# Altium schematic symbol library Regulator.SchLib: 250 symbols (part 1 of 6)
Pins are listed as number, name and electrical type; pins without a type are passive.

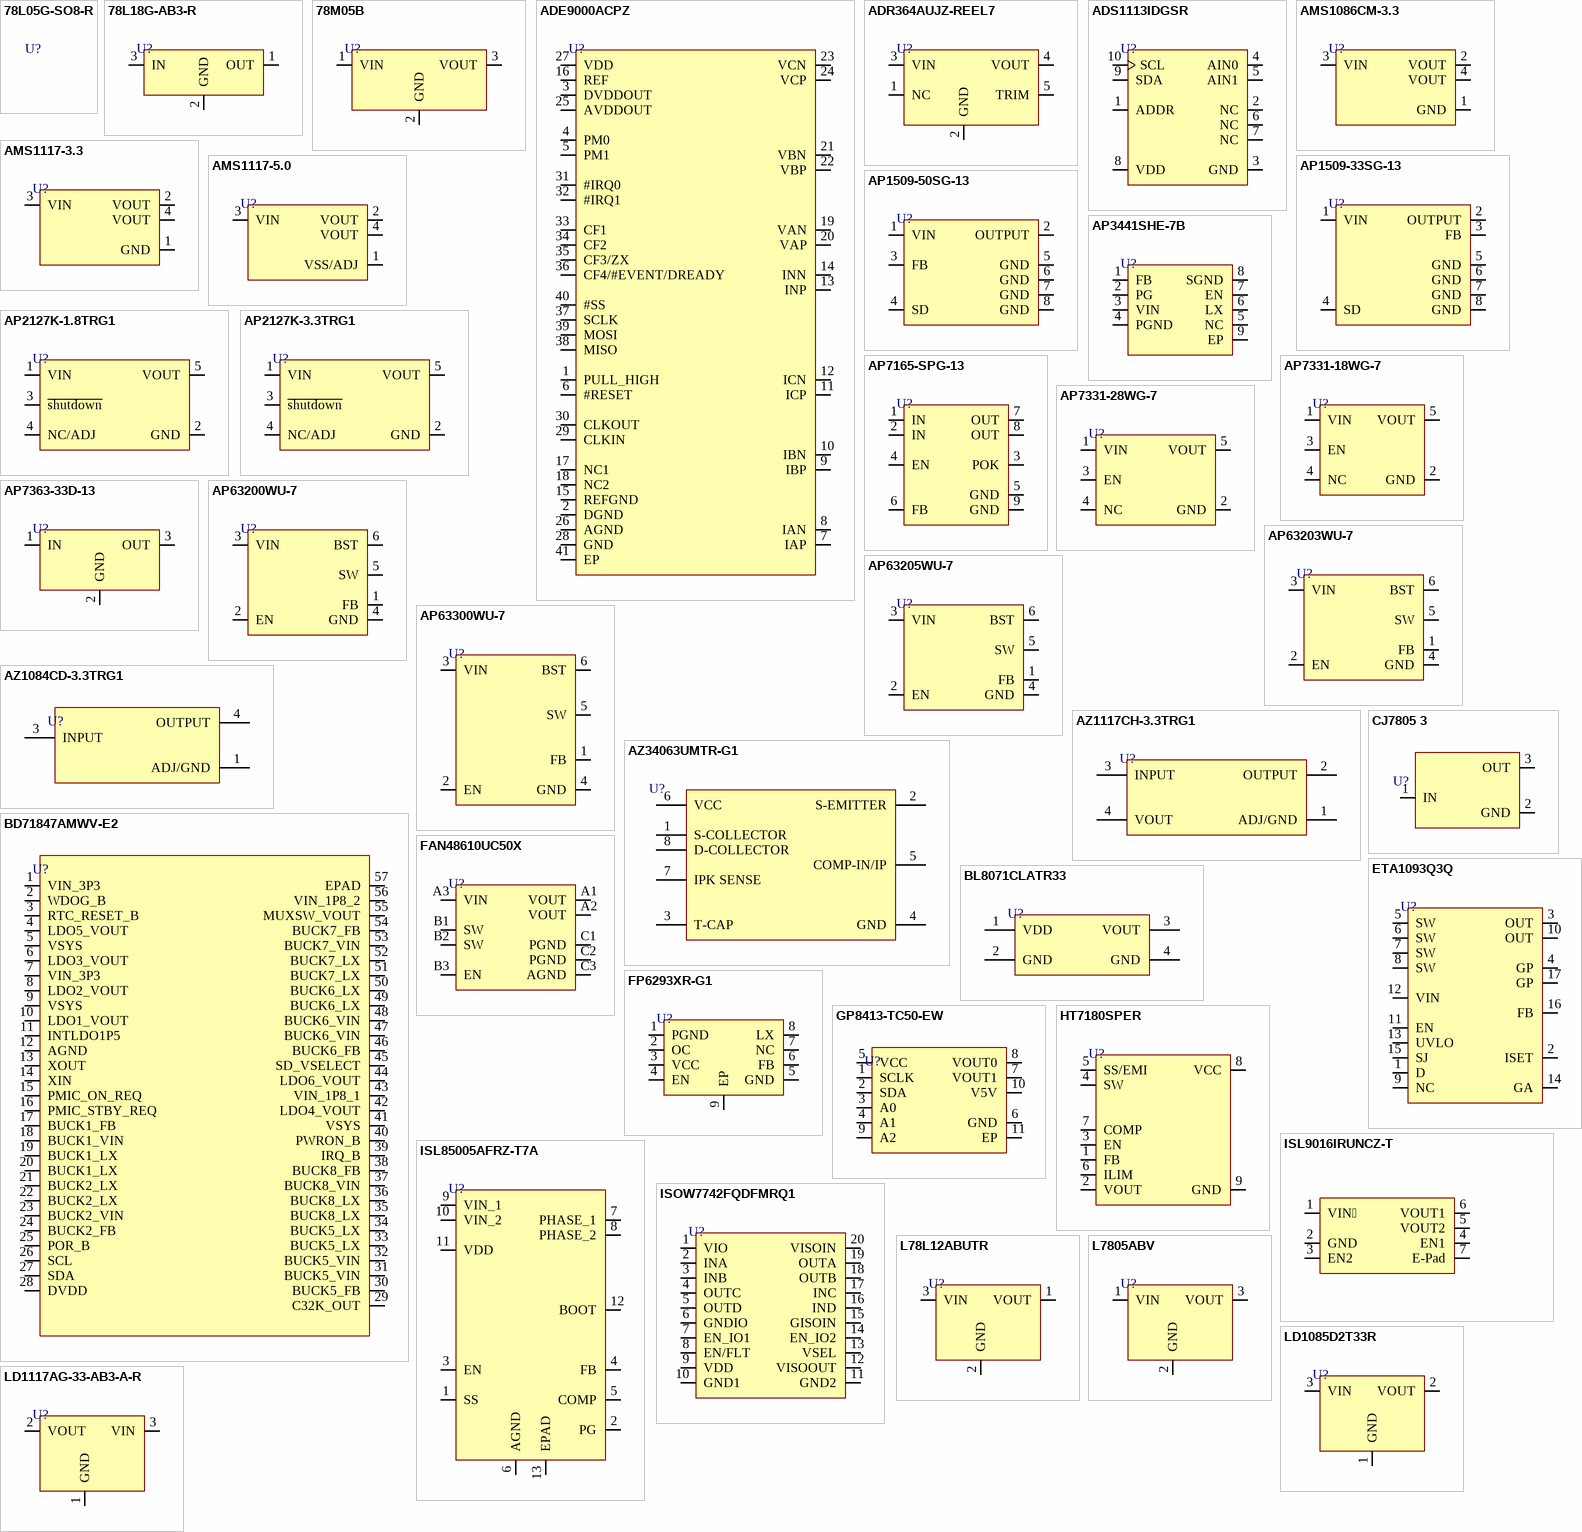
[diagram p0: symbols 78L05G-SO8-R to LD1117AG-33-AB3-A-R]

## 78L05G-SO8-R
designator U?
Pos 5V 0.1A 8-Pin SOP T/R; Manufacturer: Unisonic; Manufacturer Part Number: 78L05G-SO8-R; Item Type: IC; Package: SOP-8; LCSC Part Number: -; ComponentLink1Description: Chipsmall; ComponentLink1URL: https://www.chipsmall.com/Products/78L05G-SO8-R_35000047.html
footprint SOP-8

## 78L18G-AB3-R
designator U?
100mA Fixed 18V Positive electrode 35V SOT-89-3 Voltage Regulators - Linear, Low Drop Out (LDO) Regulators ROHS; Manufacturer: UTC; Manufacturer Part Number: 78L18G-AB3-R; Item Type: IC; Package: SOT-89-3; LCSC Part Number: C87308; ComponentLink1Description: LCSC; ComponentLink1URL: https://www.lcsc.com/product-detail/Voltage-Regulators-Linear-Low-Drop-Out-LDO-Regulators_UTC-Unisonic-Tech-78L18G-AB3-R_C87308.html
footprint SOT-89-3
pins: 1 OUT, 2 GND, 3 IN

## 78M05B
designator U?
80dB@(120Hz) 1.5A Fixed 5V Positive electrode 35V TO-252 Voltage Regulators - Linear, Low Drop Out (LDO) Regulators ROHS; Manufacturer: Slkor; Manufacturer Part Number: 78M05B; Item Type: IC; Package: TO-252; LCSC Part Number: C21714299; ComponentLink1Description: LCSC; ComponentLink1URL: https://www.lcsc.com/product-detail/Voltage-Regulators-Linear-Low-Drop-Out-LDO-Regulators_Slkor-SLKORMICRO-Elec-78M05B_C21714299.html
footprint TO-252-2L
pins: 1 VIN, 2 GND, 3 VOUT

## ADE9000ACPZ
designator U?
IC AFE 7 CHAN 40LFCSP-WQ; Manufacturer: Analog Devices; Manufacturer Part Number: ADE9000ACPZ; Supplier: Mouser; Supplier Part Number: 584-ADE9000ACPZ; RoHS: Yes; Item Type: IC; Stock: 7889; Pricing: 1=18.44, 10=13.35, 50=10.79, 100=10.79, 1000=10.52, 10000=10.52 (USD); ComponentLink1URL: http://www.farnell.com/datasheets/2280571.pdf?src-supplier=Farnell; ComponentLink1Description: http://www.farnell.com/datasheets/2280571.pdf?src-supplier=Farnell; ComponentLink2URL: https://datasheet.octopart.com/ADE9000ACPZ-Analog-Devices-datasheet-165826959.pdf?src-supplier=Element14; ComponentLink2Description: https://datasheet.octopart.com/ADE9000ACPZ-Analog-Devices-datasheet-165826959.pdf?src-supplier=Element14; ComponentLink3URL: https://www.analog.com/media/en/technical-documentation/data-sheets/ADE9000.pdf?src-supplier=Digikey; ComponentLink3Description: https://www.analog.com/media/en/technical-documentation/data-sheets/ADE9000.pdf?src-supplier=Digikey
footprint 40-LFCSP-WQ (6x6)
pins: 1 PULL_HIGH, 2 DGND, 3 DVDDOUT, 4 PM0, 5 PM1, 6 #RESET, 7 IAP, 8 IAN, 9 IBP, 10 IBN, 11 ICP, 12 ICN, 13 INP, 14 INN, 15 REFGND, 16 REF, 17 NC1, 18 NC2, 19 VAN, 20 VAP, 21 VBN, 22 VBP, 23 VCN, 24 VCP, 25 AVDDOUT, 26 AGND, 27 VDD, 28 GND, 29 CLKIN, 30 CLKOUT, 31 #IRQ0, 32 #IRQ1, 33 CF1, 34 CF2, 35 CF3/ZX, 36 CF4/#EVENT/DREADY, 37 SCLK, 38 MISO, 39 MOSI, 40 #SS, 41 EP

## ADR364AUJZ-REEL7
designator U?
IC VREF SERIES 0.2% TSOT5; Manufacturer: Analog Devices; Manufacturer Part Number: ADR364AUJZ-REEL7; Supplier: Digikey; LCSC Part Number: C659518; RoHS: Yes; Item Type: IC; Stock: 4393; Pricing: 1=2.73, 10=2.452, 25=2.318, 100=2.0089, 250=1.90588, 500=1.71014, 1000=1.44228 (USD); ComponentLink1URL: https://datasheet.ciiva.com/22697/751436-22697083.pdf?src-supplier=Element14; ComponentLink1Description: https://datasheet.ciiva.com/22697/751436-22697083.pdf?src-supplier=Element14; ComponentLink2URL: https://datasheet.ciiva.com/3237/adr360-361-363-364-365-366-3237020.pdf?src-supplier=Avnet; ComponentLink2Description: https://datasheet.ciiva.com/3237/adr360-361-363-364-365-366-3237020.pdf?src-supplier=Avnet; ComponentLink3URL: https://datasheet.ciiva.com/1172/751436-1172568.pdf?src-supplier=Element14; ComponentLink3Description: https://datasheet.ciiva.com/1172/751436-1172568.pdf?src-supplier=Element14
footprint TSOT-23-5
pins: 1 NC, 2 GND, 3 VIN, 4 VOUT, 5 TRIM

## ADS1113IDGSR
designator U?
IC ADC 16BIT SIGMA-DELTA 10VSSOP; Manufacturer: Texas Instruments; Manufacturer Part Number: ADS1113IDGSR; Supplier: Mouser; LCSC Part Number: C477969; RoHS: Yes; Item Type: IC; Stock: 1566; Pricing: 1=4.73, 10=3.6, 50=3.31, 100=2.87, 1000=2.75, 10000=2.11 (USD); Length: 3mm; Width: 3mm; Height: 1.07mm; Thickness: 1.02mm; Lead Free: 5697LeadFree; ComponentLink1URL: https://datasheet.ciiva.com/14260/sbas444b-14260060.pdf?src-supplier=Avnet; ComponentLink1Description: https://datasheet.ciiva.com/14260/sbas444b-14260060.pdf?src-supplier=Avnet; ComponentLink2URL: https://datasheet.ciiva.com/1303/ads1113-1303671.pdf?src-supplier=Digikey; ComponentLink2Description: https://datasheet.ciiva.com/1303/ads1113-1303671.pdf?src-supplier=Digikey
footprint VSSOP-10
pins: 1 ADDR "I2C slave address select", 2 NC, 3 GND "Ground", 4 AIN0 "Differential channel 1: Positive input or single-ended channel 1 input", 5 AIN1 "Differential channel 1: Negative input or single-ended channel 2 input", 6 NC, 7 NC, 8 VDD "Power supply: 2.0V to 5.5V", 9 SDA "Serial data: Transmits and receives data", 10 SCL "Serial clock input: Clocks data on SDA"

## AMS1086CM-3.3
designator U?
72dB@(120Hz) 1.5A Fixed 3.3V~3.3V Positive 15V TO-263-3 Linear Voltage Regulators (LDO) ROHS; Manufacturer: Advanced Monolithic Systems; Manufacturer Part Number: AMS1086CM-3.3; Item Type: IC; Package: TO-263-3; LCSC Part Number: C27632; ComponentLink1Description: LCSC; ComponentLink1URL: https://www.lcsc.com/product-detail/Linear-Voltage-Regulators-LDO_Advanced-Monolithic-Systems-AMS1086CM-3-3_C27632.html
footprint TO263-3_
pins: 1 GND, 2 VOUT, 3 VIN, 4 VOUT

## AMS1117-3.3
designator U?
SOT-223 Linear Voltage Regulators (LDO) ROHS; Manufacturer: GUOXIN JIAPIN SEMICONDUCTOR; Manufacturer Part Number: AMS1117-3.3; Item Type: IC; Package: SOT-223; LCSC Part Number: C2992570; ComponentLink1Description: LCSC; ComponentLink1URL: https://www.lcsc.com/product-detail/Linear-Voltage-Regulators-LDO_GUOXIN-JIAPIN-SEMICONDUCTOR-AMS1117-3-3_C2992570.html
footprint SOT- 223
pins: 1 GND, 2 VOUT, 3 VIN, 4 VOUT

## AMS1117-5.0
designator U?
SOT-223 Linear Voltage Regulators (LDO) ROHS; Manufacturer: HX(hengjiaxing); Manufacturer Part Number: AMS1117-5.0; Item Type: IC; Package: SOT-223; LCSC Part Number: C5181462; ComponentLink1Description: LCSC; ComponentLink1URL: https://www.lcsc.com/product-detail/Linear-Voltage-Regulators-LDO_HX-hengjiaxing-AMS1117-5-0_C5181462.html
footprint SOT- 223
pins: 1 VSS/ADJ, 2 VOUT, 3 VIN, 4 VOUT

## AP1509-33SG-13
designator U?
IC REG BUCK 3.3V 2A 8SOP; Manufacturer: Diodes; Manufacturer Part Number: AP1509-33SG-13; Supplier: Digi-Key; Supplier Part Number: AP1509-33SGDICT-ND; RoHS: Yes; Category: Voltage Regulators - Switching; Stock: 7160; Pricing: 1=1.6, 10=1.43, 25=1.3576, 100=1.115, 250=1.04232, 500=0.92112, 1000=0.7272 (USD); ComponentLink1URL: https://datasheet.ciiva.com/2024/ap1509-2024112.pdf?src-supplier=Digi-Key; ComponentLink1Description: https://datasheet.ciiva.com/2024/ap1509-2024112.pdf?src-supplier=Digi-Key; ComponentLink2URL: https://datasheet.ciiva.com/22696/608784-22696879.pdf?src-supplier=Element14; ComponentLink2Description: https://datasheet.ciiva.com/22696/608784-22696879.pdf?src-supplier=Element14; ComponentLink3URL: https://datasheet.ciiva.com/3220/ap1509-3220415.pdf?src-supplier=Avnet; ComponentLink3Description: https://datasheet.ciiva.com/3220/ap1509-3220415.pdf?src-supplier=Avnet; ComponentLink4URL: https://datasheet.ciiva.com/3222/ap1509-3222047.pdf?src-supplier=Avnet; ComponentLink4Description: https://datasheet.ciiva.com/3222/ap1509-3222047.pdf?src-supplier=Avnet; ComponentLink5URL: https://datasheet.ciiva.com/1161/608784-1161659.pdf?src-supplier=Element14; ComponentLink5Description: https://datasheet.ciiva.com/1161/608784-1161659.pdf?src-supplier=Element14; LCSC Part Number: C151823; Item Type: IC
footprint SOP-8L
pins: 1 VIN, 2 OUTPUT, 3 FB, 4 SD, 5 GND, 6 GND, 7 GND, 8 GND

## AP1509-50SG-13
designator U?
IC REG BUCK 5V 2A 8SOP; Manufacturer: Diodes; Manufacturer Part Number: AP1509-50SG-13; Number of Outputs: 1; Min Input Voltage: 4.5V; Max Supply Voltage: 22V; Efficiency: 83%; Switching Frequency: 150kHz; Synchronous Rectifier: No; Operating Supply Current: 5mA; Output Type: Fixed; Output Configuration: Positive; Frequency: 173kHz; Supplier 1: Rs; RoHS: Yes; Category: Voltage Regulators - Switching; Stock 1: 2230; Pricing 1: 25=1.20600, 125=0.91800, 625=0.81800, 1250=0.63800 (GBP); Mounting Technology: Surface Mount; Case/Package: SOP; Pins: 8; Weight: 0.030018oz; Contact Plating: Tin,Matte; Min Operating Temperature: -20°C; Max Operating Temperature: 85°C; Packaging: Tape and Reel; Output Voltage: 5V; Max Output current: 2A; Package Quantity: 2500; Output Current: 2A; Min Supply Voltage: 4.5V; Nominal Output Voltage: 5V; Min Output Voltage: 5V; Max Output Voltage: 5V; Operating Supply Voltage: 22V; Series: -; Length: 4.95mm; Width: 3.95mm; Height: 1.5mm; Reach SVHC Compliant: Yes; Lead Free: Lead Free; RoHS Compliant: Yes; ComponentLink1URL: https://datasheet.ciiva.com/1161/608784-1161660.pdf?src-supplier=Element14; ComponentLink1Description: https://datasheet.ciiva.com/1161/608784-1161660.pdf?src-supplier=Element14; Supplier Part Number 1: 7512923P; LCSC Part Number: C9984; Item Type: IC
footprint SOP-8
pins: 1 VIN, 2 OUTPUT, 3 FB, 4 SD, 5 GND, 6 GND, 7 GND, 8 GND

## AP2127K-1.8TRG1
designator U?
IC REG LDO 1.8V 0.3A SOT23-5; Manufacturer: Diodes; Manufacturer Part Number: AP2127K-1.8TRG1; Dropout Voltage: 600mV; Number of Outputs: 1; Min Input Voltage: 2.5V; Max Input Voltage: 6V; Output Current: 300mA; Polarity: Positive; Quiescent Current: 90uA; Reference Voltage: 800mV; Accuracy: 2%; Power Supply Rejection Ratio (PSRR): 68dB; Max Output Current: 400mA; Output Type: Fixed; Supplier 1: Digi-Key; RoHS: Yes; Category: Voltage Regulators - Linear; Stock 1: 112006; Pricing 1: 1=0.39000, 10=0.29400, 25=0.26480, 100=0.18290, 250=0.15400, 500=0.12512, 1000=0.09625 (USD); Mount: Surface Mount; Case/Package: SOT-23-5; Number of Pins: 5; Weight: 0.001058oz; Min Operating Temperature: -40°C; Max Operating Temperature: 85°C; Package Quantity: 3000; Packaging: Tape and Reel; Output Voltage: 1.8V; Number of Regulators: 1; Length: 3.1mm; Width: 1.7mm; Height: 1.3mm; Lead Free: Lead Free; RoHS Compliant: Yes; ComponentLink1URL: https://datasheet.ciiva.com/30016/ap2127-30016757.pdf?src-supplier=Avnet; ComponentLink1Description: https://datasheet.ciiva.com/30016/ap2127-30016757.pdf?src-supplier=Avnet; ComponentLink2URL: https://datasheet.ciiva.com/29569/ap2127-29569925.pdf?src-supplier=Digi-Key; ComponentLink2Description: https://datasheet.ciiva.com/29569/ap2127-29569925.pdf?src-supplier=Digi-Key; Supplier Part Number 1: AP2127K-1.8TRG1DICT-ND; Item Type: IC
footprint SOT-23-5
pins: 1 VIN, 2 GND, 3 ~{shutdown}, 4 NC/ADJ, 5 VOUT

## AP2127K-3.3TRG1
designator U?
IC REG LINEAR 3.3V 300MA SOT23-5; Manufacturer: Diodes; Manufacturer Part Number: AP2127K-3.3TRG1; Supplier: Arrow Electronics; LCSC Part Number: C156285; RoHS: Yes; Item Type: IC; Stock: 45000; Pricing: 3000=0.0623, 6000=0.0623 (USD); ComponentLink1URL: https://datasheet.ciiva.com/30016/ap2127-30016760.pdf?src-supplier=Avnet; ComponentLink1Description: https://datasheet.ciiva.com/30016/ap2127-30016760.pdf?src-supplier=Avnet; ComponentLink2URL: https://datasheet.ciiva.com/29569/ap2127-29569893.pdf?src-supplier=Digikey; ComponentLink2Description: https://datasheet.ciiva.com/29569/ap2127-29569893.pdf?src-supplier=Digikey
footprint SOT-23-5
pins: 1 VIN, 2 GND, 3 ~{shutdown}, 4 NC/ADJ, 5 VOUT

## AP3441SHE-7B
designator U?
IC REG BUCK ADJ 3A UDFN20208; Manufacturer: Diodes; Manufacturer Part Number: AP3441SHE-7B; Supplier: Digikey; LCSC Part Number: C2070918; RoHS: Yes; Item Type: IC; Stock: 2949; Pricing: 1=0.72, 10=0.43, 25=0.3544, 100=0.2688, 250=0.22676, 500=0.20086, 1000=0.17916 (USD); RoHS Compliant: Yes
footprint DFN2020-8-EP
pins: 1 FB, 2 PG, 3 VIN, 4 PGND, 5 NC, 6 LX, 7 EN, 8 SGND, 9 EP

## AP7165-SPG-13
designator U?
IC REG LINEAR POS ADJ 600MA 8SO; Manufacturer: Diodes; Manufacturer Part Number: AP7165-SPG-13; Output Voltage: 5V; Number of Outputs: 1; Min Input Voltage: 2.2V; Max Input Voltage: 5.5V; Max Power Dissipation: 1.9W; Polarity: Positive; Quiescent Current: 170uA; Accuracy: 2.5%; Output Type: Adjustable; Dropout Voltage: 300mV; Input Bias Current: 125uA; Reference Voltage: 800mV; Power Dissipation: 1.9kW; Power Rating: 4W; Power Supply Rejection Ratio (PSRR): 60dB; Supplier 1: Arrow Electronics; RoHS: Yes; Category: Voltage Regulators - Linear; Stock 1: 5000; Pricing 1: 2500=0.28480 (USD); Mount: Surface Mount; Case/Package: SOIC; Number of Pins: 8; Min Operating Temperature: -40°C; Max Operating Temperature: 85°C; Max Output Current: 600mA; Package Quantity: 2500; Output Current: 600mA; Packaging: Tape and Reel; Number of Regulators: 1; Min Current Limit: 600mA; Series: -; Length: 4.95mm; Width: 3.95mm; Height: 1.5mm; Radiation Hardening: No; Lead Free: Lead Free; RoHS Compliant: Yes; ComponentLink1URL: https://datasheet.ciiva.com/26856/getdatasheetpartid-624973-26856354.pdf?src-supplier=Verical; ComponentLink1Description: https://datasheet.ciiva.com/26856/getdatasheetpartid-624973-26856354.pdf?src-supplier=Verical; ComponentLink2URL: https://datasheet.ciiva.com/8240/ap7165-8240044.pdf?src-supplier=Avnet; ComponentLink2Description: https://datasheet.ciiva.com/8240/ap7165-8240044.pdf?src-supplier=Avnet; Supplier Part Number 1: AP7165-SPG-13; LCSC Part Number: C460364; Item Type: IC
footprint 8-SO-EP_
pins: 1 IN, 2 IN, 3 POK, 4 EN, 5 GND, 6 FB, 7 OUT, 8 OUT, 9 GND

## AP7331-18WG-7
designator U?
IC REG LINEAR 1.8V 300MA SOT25; Manufacturer: Diodes; Manufacturer Part Number: AP7331-18WG-7; Number of Outputs: 1; Min Input Voltage: 2V; Max Input Voltage: 6V; Max Power Dissipation: 640mW; Polarity: Positive; Quiescent Current: 55uA; Accuracy: 2%; Output Type: Fixed; Dropout Voltage: 550mV; Min Current Limit: 400mA; Reference Voltage: 400mV; Power Dissipation: 640W; Power Supply Rejection Ratio (PSRR): 65dB; Supplier 1: Digi-Key; RoHS: Yes; Category: Voltage Regulators - Linear; Stock 1: 2879; Pricing 1: 1=0.48000, 10=0.38700, 25=0.35400, 100=0.26360, 250=0.23884, 500=0.19766, 1000=0.14825 (USD); Mount: Surface Mount; Case/Package: SOT-25; Number of Pins: 5; Contact Plating: Tin,Matte; Min Operating Temperature: -40°C; Max Operating Temperature: 85°C; Max Output Current: 300mA; Output Voltage: 1.8V; Packaging: Tape and Reel; Output Current: 300mA; Package Quantity: 3000; Number of Regulators: 1; Series: AP7331; Length: 3.1mm; Width: 1.7mm; Height: 1.3mm; Radiation Hardening: No; Lead Free: Lead Free; REACH SVHC: No SVHC; RoHS Compliant: Yes; ComponentLink1URL: https://datasheet.ciiva.com/4887/ap7331-84206-4887904.pdf?src-supplier=Mouser; ComponentLink1Description: https://datasheet.ciiva.com/4887/ap7331-84206-4887904.pdf?src-supplier=Mouser; ComponentLink2URL: https://datasheet.ciiva.com/26856/getdatasheetpartid-661842-26856377.pdf?src-supplier=Verical; ComponentLink2Description: https://datasheet.ciiva.com/26856/getdatasheetpartid-661842-26856377.pdf?src-supplier=Verical; ComponentLink3URL: https://datasheet.ciiva.com/26908/ap7331-18wg-7-26908418.pdf?src-supplier=IIIC; ComponentLink3Description: https://datasheet.ciiva.com/26908/ap7331-18wg-7-26908418.pdf?src-supplier=IIIC; Supplier Part Number 1: AP7331-18WG-7DICT-ND; LCSC Part Number: C155293; Item Type: IC
footprint SOT-23-5
pins: 1 VIN, 2 GND, 3 EN, 4 NC, 5 VOUT

## AP7331-28WG-7
designator U?
IC REG LINEAR 2.8V 300MA SOT25; Manufacturer: Diodes; Manufacturer Part Number: AP7331-28WG-7; Number of Outputs: 1; Min Input Voltage: 2V; Max Input Voltage: 6V; Max Power Dissipation: 640mW; Polarity: Positive; Quiescent Current: 75uA; Accuracy: 2%; Output Type: Fixed; Dropout Voltage: 300mV; Operating Supply Current: 65uA; Reference Voltage: 400mV; Min Current Limit: 400mA; Power Supply Rejection Ratio (PSRR): 65dB; Supplier 1: Digi-Key; RoHS: Yes; Category: Voltage Regulators - Linear; Stock 1: 8767; Pricing 1: 1=0.52000, 10=0.41800, 25=0.38280, 100=0.28490, 250=0.25820, 500=0.21370, 1000=0.16027 (USD); Mount: Surface Mount; Case/Package: SOT-25; Number of Pins: 5; Min Operating Temperature: -40°C; Max Operating Temperature: 85°C; Max Output Current: 300mA; Output Voltage: 2.8V; Packaging: Tape and Reel; Package Quantity: 3000; Output Current: 300mA; Number of Regulators: 1; Series: -; Length: 3.1mm; Width: 1.7mm; Height: 1.3mm; Radiation Hardening: No; Lead Free: Lead Free; REACH SVHC: No SVHC; RoHS Compliant: Yes; ComponentLink1URL: https://datasheet.ciiva.com/17365/ap7331-17365896.pdf?src-supplier=Avnet+Europe; ComponentLink1Description: https://datasheet.ciiva.com/17365/ap7331-17365896.pdf?src-supplier=Avnet+Europe; Supplier Part Number 1: AP7331-28WG-7DICT-ND; LCSC Part Number: C460376; Item Type: IC
footprint SOT-23-5
pins: 1 VIN, 2 GND, 3 EN, 4 NC, 5 VOUT

## AP7363-33D-13
designator U?
IC REG LINEAR 3.3V 1.5A TO252-3; Manufacturer: Diodes; Manufacturer Part Number: AP7363-33D-13; Supplier: Mouser; LCSC Part Number: C108723; RoHS: Yes; Item Type: IC; Stock: 7040; Pricing: 1=0.92, 10=0.462, 50=0.462, 100=0.306, 1000=0.245, 10000=0.188 (USD); ComponentLink1URL: http://www.mouser.com/ds/2/115/AP7363-247326.pdf?src-supplier=Mouser; ComponentLink1Description: http://www.mouser.com/ds/2/115/AP7363-247326.pdf?src-supplier=Mouser; ComponentLink2URL: https://datasheet.octopart.com/AP7363-33D-13-Diodes-Inc.-datasheet-141402625.pdf?src-supplier=Element14; ComponentLink2Description: https://datasheet.octopart.com/AP7363-33D-13-Diodes-Inc.-datasheet-141402625.pdf?src-supplier=Element14; ComponentLink3URL: http://www.diodes.com/datasheets/AP7363.pdf?src-supplier=Avnet; ComponentLink3Description: http://www.diodes.com/datasheets/AP7363.pdf?src-supplier=Avnet; ComponentLink4URL: https://www.diodes.com/assets/Datasheets/AP7363.pdf?src-supplier=Digikey; ComponentLink4Description: https://www.diodes.com/assets/Datasheets/AP7363.pdf?src-supplier=Digikey; ComponentLink5URL: https://datasheet.octopart.com/AP7363-33D-13-Diodes-Inc.-datasheet-17557726.pdf?src-supplier=SHENGYU+ELECTRONICS; ComponentLink5Description: https://datasheet.octopart.com/AP7363-33D-13-Diodes-Inc.-datasheet-17557726.pdf?src-supplier=SHENGYU+ELECTRONICS
footprint TO-252-2L
pins: 1 IN, 2 GND, 3 OUT

## AP63200WU-7
designator U?
IC REG BUCK ADJUSTABLE 2A TSOT26; Manufacturer: Diodes; Manufacturer Part Number: AP63200WU-7; Supplier: Future Electronics; Supplier Part Number: 1108623; RoHS: Yes; Category: Voltage Regulators - Switching; Stock: 70; Pricing: 1=0.425, 15=0.385, 75=0.36, 300=0.345, 1500=0.315 (USD); ComponentLink1URL: https://www.diodes.com/assets/Datasheets/AP63200-AP63201-AP63203-AP63205.pdf?src-supplier=Digi-Key; ComponentLink1Description: https://www.diodes.com/assets/Datasheets/AP63200-AP63201-AP63203-AP63205.pdf?src-supplier=Digi-Key; LCSC Part Number: C2071868; Item Type: IC
footprint TSOT-26-6
pins: 1 FB, 2 EN, 3 VIN, 4 GND, 5 SW, 6 BST

## AP63203WU-7
designator U?
IC REG BUCK 3.3V 2A TSOT26; Manufacturer: Diodes; Manufacturer Part Number: AP63203WU-7; Supplier: Future Electronics; Supplier Part Number: 6109504; RoHS: Yes; Category: Voltage Regulators - Switching; Stock: 3000; Pricing: 3000=0.34, 6000=0.335, 9000=0.33, 12000=0.33, 15000=0.32 (USD); ComponentLink1URL: https://www.diodes.com/assets/Datasheets/AP63200-AP63201-AP63203-AP63205.pdf?src-supplier=Digi-Key; ComponentLink1Description: https://www.diodes.com/assets/Datasheets/AP63200-AP63201-AP63203-AP63205.pdf?src-supplier=Digi-Key; LCSC Part Number: C780769; Item Type: IC
footprint TSOT-23-6
pins: 1 FB, 2 EN, 3 VIN, 4 GND, 5 SW, 6 BST

## AP63205WU-7
designator U?
IC REG BUCK 5V 2A TSOT26; Manufacturer: Diodes; Manufacturer Part Number: AP63205WU-7; Supplier 1: Digi-Key; RoHS: Yes; Category: Voltage Regulators - Switching; Stock 1: 88525; Pricing 1: 1=0.88, 10=0.776, 25=0.7292, 100=0.5952, 250=0.55284, 500=0.4705, 1000=0.3764 (USD); Supplier Part Number 1: AP63205WU-7DICT-ND; LCSC Part Number: C2071056; Item Type: IC
footprint TSOT-23-6
pins: 1 FB, 2 EN, 3 VIN, 4 GND, 5 SW, 6 BST

## AP63300WU-7
designator U?
IC REG BUCK ADJ 3A TSOT26; Manufacturer: Diodes; Manufacturer Part Number: AP63300WU-7; Output Type: Adjustable; Output Configuration: Positive; Number of Outputs: 1; Min Input Voltage: 3.8V; Max Supply Voltage: 32V; Min Output Voltage: 800mV; Max Output Voltage: 31V; Switching Frequency: 500kHz; Synchronous Rectifier: Yes; Supplier: Digikey; Supplier Part Number: 31-AP63300WU-7CT-ND; RoHS: No; Category: Voltage Regulators - Switching; Stock: 11398; Pricing: 1=0.92, 10=0.818, 25=0.7764, 100=0.6379, 250=0.59628, 500=0.52696, 1000=0.41602 (USD); Mounting Technology: Surface Mount; Case/Package: SOT-23-6; Min Operating Temperature: -40°C; Max Operating Temperature: 85°C; Series: -; Output Current: 3A; RoHS Compliant: Yes; ComponentLink1URL: https://www.diodes.com/assets/Datasheets/AP63300-AP63301.pdf?src-supplier=Digikey; ComponentLink1Description: https://www.diodes.com/assets/Datasheets/AP63300-AP63301.pdf?src-supplier=Digikey; ComponentLink2URL: https://datasheet.octopart.com/AP63300WU-7-Diodes-Inc.-datasheet-149521342.pdf?src-supplier=Future+Electronics; ComponentLink2Description: https://datasheet.octopart.com/AP63300WU-7-Diodes-Inc.-datasheet-149521342.pdf?src-supplier=Future+Electronics; LCSC Part Number: C2158012; Item Type: IC
footprint TSOT-23-6
pins: 1 FB, 2 EN, 3 VIN, 4 GND, 5 SW, 6 BST

## AZ1084CD-3.3TRG1
designator U?
IC REG LINEAR 3.3V 5A TO252-2; Manufacturer: Diodes; Manufacturer Part Number: AZ1084CD-3.3TRG1; Number of Outputs: 1; Max Input Voltage: 12V; Dropout Voltage: 1.35V; Min Current Limit: 5.5A; Polarity: Positive; Quiescent Current: 5mA; Reference Voltage: 1.262V; Power Supply Rejection Ratio (PSRR): 72dB; Output Type: Fixed; Supplier 1: RSComponents; RoHS: Yes; Category: Voltage Regulators - Linear; Stock 1: 1000; Pricing 1: 100=0.23900, 200=0.22800, 400=0.21600, 800=0.20500 (GBP); Mount: Surface Mount; Case/Package: TO-252-3; Number of Pins: 3; Min Operating Temperature: 0°C; Max Operating Temperature: 125°C; Max Output Current: 5A; Output Voltage: 3.3V; Package Quantity: 2500; Packaging: Tape and Reel; Output Current: 5A; Number of Regulators: 1; Length: 6.73mm; Width: 6.22mm; Height: 2.38mm; RoHS Compliant: Yes; ComponentLink1URL: https://datasheet.ciiva.com/29570/az1084c-29570097.pdf?src-supplier=Digi-Key; ComponentLink1Description: https://datasheet.ciiva.com/29570/az1084c-29570097.pdf?src-supplier=Digi-Key; Supplier Part Number 1: 8287570P; LCSC Part Number: C151391; Item Type: IC
footprint TO-252AA
pins: 1 ADJ/GND, 3 INPUT, 4 OUTPUT

## AZ1117CH-3.3TRG1
designator U?
15V 1.3V @ 800mA Fixed 3.3V SOT-223 Linear Voltage Regulators (LDO) ROHS; Manufacturer: Diodes Incorporated; Manufacturer Part Number: AZ1117CH-3.3TRG1; Item Type: IC; Package: SOT-223; LCSC Part Number: C92102; ComponentLink1Description: LCSC; ComponentLink1URL: https://lcsc.com/product-detail/Linear-Voltage-Regulators-LDO_Diodes-Incorporated-AZ1117CH-3-3TRG1_C92102.html
footprint SOT- 223
pins: 1 ADJ/GND, 2 OUTPUT, 3 INPUT, 4 VOUT

## AZ34063UMTR-G1
designator U?
IC REG BUCK BST ADJ 1.5A 8SOIC; Manufacturer: Diodes; Manufacturer Part Number: AZ34063UMTR-G1; Number of Outputs: 1; Output Voltage: 36V; Min Input Voltage: 3V; Min Output Voltage: 1.25V; Switching Frequency: 180kHz; Synchronous Rectifier: No; Operating Supply Current: 4mA; Output Type: Adjustable; Supplier 1: Digi-Key; RoHS: Yes; Category: Power Supply Modules; Stock 1: 13716; Pricing 1: 1=0.51000, 10=0.41500, 25=0.37920, 100=0.28220, 250=0.25576, 500=0.21166, 1000=0.15875 (USD); Mount: Surface Mount; Case/Package: SOIC; Number of Pins: 8; Weight: 0.00261oz; Min Operating Temperature: -40°C; Max Operating Temperature: 85°C; Packaging: Tape and Reel; Max Output Current: 1.5A; Max Input Voltage: 36V; Package Quantity: 4000; Max Output Voltage: 36V; Output Current: 1.5A; Min Supply Voltage: 3V; Operating Supply Voltage: 36V; Length: 5.1mm; Width: 4mm; Height: 1.45mm; Lead Free: Lead Free; RoHS Compliant: Yes; ComponentLink1URL: https://datasheet.ciiva.com/29734/az34063u-29734577.pdf?src-supplier=Digi-Key; ComponentLink1Description: https://datasheet.ciiva.com/29734/az34063u-29734577.pdf?src-supplier=Digi-Key; ComponentLink2URL: https://datasheet.ciiva.com/29734/az34063u-29734583.pdf?src-supplier=Digi-Key; ComponentLink2Description: https://datasheet.ciiva.com/29734/az34063u-29734583.pdf?src-supplier=Digi-Key; ComponentLink3URL: https://datasheet.ciiva.com/29734/az34063u-29734572.pdf?src-supplier=Digi-Key; ComponentLink3Description: https://datasheet.ciiva.com/29734/az34063u-29734572.pdf?src-supplier=Digi-Key; Supplier Part Number 1: AZ34063UMTR-G1DICT-ND; LCSC Part Number: C99659; Item Type: IC
footprint SOIC-8
pins: 1 S-COLLECTOR, 2 S-EMITTER, 3 T-CAP, 4 GND, 5 COMP-IN/IP, 6 VCC, 7 IPK SENSE, 8 D-COLLECTOR

## BD71847AMWV-E2
designator U?
PMIC 12 Output Step-Down (Buck) (6), Linear (LDO) (6) 2MHz UQFN56BV7070; Manufacturer: Rohm; Manufacturer Part Number: BD71847AMWV-E2; Item Type: IC; Supplier: Rs; Supplier Part Number: 1887018; RoHS: Yes; Category: Voltage Regulators - Switching; Stock: 8; Pricing: 1=3.83, 10=3.72, 20=3.64 (GBP); ComponentLink1URL: http://www.farnell.com/datasheets/2788423.pdf?src-supplier=Farnell; ComponentLink1Description: http://www.farnell.com/datasheets/2788423.pdf?src-supplier=Farnell; ComponentLink2URL: https://www.rohm.com/datasheet/BD71847AMWV/bd71847amwv-e?src-supplier=Digi-Key; ComponentLink2Description: https://www.rohm.com/datasheet/BD71847AMWV/bd71847amwv-e?src-supplier=Digi-Key; ComponentLink3URL: https://datasheet.octopart.com/BD71847AMWV-E2-Rohm-datasheet-136696178.pdf?src-supplier=Future+Electronics; ComponentLink3Description: https://datasheet.octopart.com/BD71847AMWV-E2-Rohm-datasheet-136696178.pdf?src-supplier=Future+Electronics; ComponentLink4URL: http://www.farnell.com/datasheets/2788423.pdf?src-supplier=Newark; ComponentLink4Description: http://www.farnell.com/datasheets/2788423.pdf?src-supplier=Newark; ComponentLink5URL: https://datasheet.octopart.com/BD71847AMWV-E2-ROHM-datasheet-151900815.pdf?src-supplier=SHENGYU+ELECTRONICS; ComponentLink5Description: https://datasheet.octopart.com/BD71847AMWV-E2-ROHM-datasheet-151900815.pdf?src-supplier=SHENGYU+ELECTRONICS
footprint UQFN56BV7070
pins: 1 VIN_3P3, 2 WDOG_B, 3 RTC_RESET_B, 4 LDO5_VOUT, 5 VSYS, 6 LDO3_VOUT, 7 VIN_3P3, 8 LDO2_VOUT, 9 VSYS, 10 LDO1_VOUT, 11 INTLDO1P5, 12 AGND, 13 XOUT, 14 XIN, 15 PMIC_ON_REQ, 16 PMIC_STBY_REQ, 17 BUCK1_FB, 18 BUCK1_VIN, 19 BUCK1_LX, 20 BUCK1_LX, 21 BUCK2_LX, 22 BUCK2_LX, 23 BUCK2_VIN, 24 BUCK2_FB, 25 POR_B, 26 SCL, 27 SDA, 28 DVDD, 29 C32K_OUT, 30 BUCK5_FB, 31 BUCK5_VIN, 32 BUCK5_VIN, 33 BUCK5_LX, 34 BUCK5_LX, 35 BUCK8_LX, 36 BUCK8_LX, 37 BUCK8_VIN, 38 BUCK8_FB, 39 IRQ_B, 40 PWRON_B, 41 VSYS, 42 LDO4_VOUT, 43 VIN_1P8_1, 44 LDO6_VOUT, 45 SD_VSELECT, 46 BUCK6_FB, 47 BUCK6_VIN, 48 BUCK6_VIN, 49 BUCK6_LX, 50 BUCK6_LX, 51 BUCK7_LX, 52 BUCK7_LX, 53 BUCK7_VIN, 54 BUCK7_FB, 55 MUXSW_VOUT, 56 VIN_1P8_2, 57 EPAD

## BL8071CLATR33
designator U?
70dB@(100Hz) 1.5A Fixed 3.3V~3.3V Positive 6V SOT-223 Linear Voltage Regulators (LDO) ROHS; Manufacturer: BL(Shanghai Belling); Manufacturer Part Number: BL8071CLATR33; Item Type: IC; Package: SOT-223; LCSC Part Number: C401677; ComponentLink1Description: LCSC; ComponentLink1URL: https://www.lcsc.com/product-detail/Linear-Voltage-Regulators-LDO_BL-Shanghai-Belling-BL8071CLATR33_C401677.html
footprint SOT- 223
pins: 1 VDD, 2 GND, 3 VOUT, 4 GND

## CJ7805 3
designator U?
1.5A Fixed 5V Positive 35V TO-252 Linear Voltage Regulators (LDO) ROHS; Manufacturer: Jiangsu Changjing Electronics Technology Co; Manufacturer Part Number: CJ7805 3%; Item Type: IC; Package: TO-252; LCSC Part Number: C21706; ComponentLink1Description: LCSC; ComponentLink1URL: *
footprint TO-252-2L
pins: 1 IN, 2 GND, 3 OUT

## ETA1093Q3Q
designator U?
QFN3x3-16 DC-DC Converters ROHS; Manufacturer: etasolution; Manufacturer Part Number: ETA1093Q3Q; Item Type: IC; ComponentLink1Description: LCSC; ComponentLink1URL: https://www.lcsc.com/product-detail/DC-DC-Converters_etasolution-ETA1093Q3Q_C7435199.html; Package: QFN3x3-16; LCSC Part Number: C7435199
footprint 16-QFN (3x3).
pins: 1 D, 2 ISET, 3 OUT, 4 GP, 5 SW, 6 SW, 7 SW, 8 SW, 9 NC, 10 OUT, 11 EN, 12 VIN, 13 UVLO, 14 GA, 15 SJ, 16 FB, 17 GP

## FAN48610UC50X
designator U?
IC REG BOOST 5V 1A 9WLCSP; Manufacturer: ON Semiconductor / Fairchild; Manufacturer Part Number: FAN48610UC50X; Supplier: Avnet; Supplier Part Number: FAN48610UC50X; RoHS: Yes; Stock: 1164000; Pricing: 893=0.4144, 900=0.4032, 1800=0.392, 4500=0.3808, 9000=0.3696, 45000=0.3584, 90000=0.3472 (USD); ComponentLink1URL: https://datasheet.ciiva.com/29732/fan48610-29732973.pdf?src-supplier=Digi-Key; ComponentLink1Description: https://datasheet.ciiva.com/29732/fan48610-29732973.pdf?src-supplier=Digi-Key; ComponentLink2URL: https://datasheet.ciiva.com/29732/fan48610-29732983.pdf?src-supplier=Digi-Key; ComponentLink2Description: https://datasheet.ciiva.com/29732/fan48610-29732983.pdf?src-supplier=Digi-Key; ComponentLink3URL: https://datasheet.ciiva.com/30018/fan48610-30018312.pdf?src-supplier=Avnet; ComponentLink3Description: https://datasheet.ciiva.com/30018/fan48610-30018312.pdf?src-supplier=Avnet; LCSC Part Number: C890712; Item Type: IC
footprint WLCSP-9 (1.22x1.22)
pins: A1 VOUT, A2 VOUT, A3 VIN, B1 SW, B2 SW, B3 EN, C1 PGND, C2 PGND, C3 AGND

## FP6293XR-G1
designator U?
Boost type 13V 3.5A 2.6V~5.5V SOP-8-EP DC-DC Converters ROHS; Manufacturer: Advanced Analog Technology; Manufacturer Part Number: FP6293XR-G1; Item Type: IC; Package: SOP-8-EP; LCSC Part Number: C83576; ComponentLink1Description: LCSC; ComponentLink1URL: https://www.lcsc.com/product-detail/DC-DC-Converters_Advanced-Analog-Technology-FP6293XR-G1_C83576.html
footprint SOP-8-EP
pins: 1 PGND, 2 OC, 3 VCC, 4 EN, 5 GND, 6 FB, 7 NC, 8 LX, 9 EP

## GP8413-TC50-EW
designator U?
I2C ESOP-10 Digital to Analog Converters (DAC) ROHS; Manufacturer: Guestgood; Manufacturer Part Number: GP8413-TC50-EW; Item Type: IC; Package: ESOP-10; LCSC Part Number: C5464816; ComponentLink1Description: LCSC; ComponentLink1URL: https://www.lcsc.com/product-detail/Digital-to-Analog-Converters-DAC_Guestgood-GP8413-TC50-EW_C5464816.html
footprint ESOP-10
pins: 1 SCLK, 2 SDA, 3 A0, 4 A1, 5 VCC, 6 GND, 7 VOUT1, 8 VOUT0, 9 A2, 10 V5V, 11 EP

## HT7180SPER
designator U?
Boost type 12.8V 2.7V~12V 10A ESOP-8 DC-DC Converters ROHS; Manufacturer: Jiaxing Heroic Elec Tech; Manufacturer Part Number: HT7180SPER; Item Type: IC; Package: ESOP-8; LCSC Part Number: C22391195; ComponentLink1Description: LCSC; ComponentLink1URL: https://www.lcsc.com/product-detail/DC-DC-Converters_Jiaxing-Heroic-Elec-Tech-HT7180SPER_C22391195.html
footprint ESOP-8
pins: 1 FB, 2 VOUT, 3 EN, 4 SW, 5 SS/EMI, 6 ILIM, 7 COMP, 8 VCC, 9 GND

## ISL9016IRUNCZ-T
designator U?
IC REG LINEAR 3.3V/1.8V 6UTDFN; Item Type: IC; Supplier: Mouser; Supplier Part Number: 968-ISL9016IRUNCZ-T; RoHS: Yes; Stock: 3967; Pricing: 1=1.37, 10=1.16, 50=1.16, 100=0.891, 1000=0.622, 10000=0.53 (USD); ComponentLink2URL: https://www.renesas.com/en-us/www/doc/datasheet/isl9016.pdf?src-supplier=Digi-Key; ComponentLink2Description: https://www.renesas.com/en-us/www/doc/datasheet/isl9016.pdf?src-supplier=Digi-Key
footprint 6-UTDFN (1.6x1.6)
pins: 1 VIN, 2 GND, 3 EN2, 4 EN1, 5 VOUT2, 6 VOUT1, 7 E-Pad

## ISL85005AFRZ-T7A
designator U?
IC REG BUCK ADJ 5A 12DFN; Manufacturer: Renesas Electronics Corporation; Manufacturer Part Number: ISL85005AFRZ-T7A; Package: 12-DFN (4x3); LCSC Part Number: -; Item Type: IC; ComponentLink1Description: LCSC; ComponentLink1URL: *
footprint 12-DFN (4x3)
pins: 1 SS, 2 PG, 3 EN, 4 FB, 5 COMP, 6 AGND, 7 PHASE_1, 8 PHASE_2, 9 VIN_1, 10 VIN_2, 11 VDD, 12 BOOT, 13 EPAD

## ISOW7742FQDFMRQ1
designator U?
DGTL ISOLTR 5KV 4CH GP 20-SOIC; Manufacturer: Texas Instruments; Manufacturer Part Number: ISOW7742FQDFMRQ1; Manufacturer Lifecycle Status: ACTIVE; Item Type: IC; Supplier: DigiKey; LCSC Part Number: C7290756; RoHS: Compliant; Stock: 954; Pricing: 1=11.22, 10=8.791, 25=8.1828, 100=7.5143, 250=7.19556 (USD); Case/Package: SOIC; Height: 3.55mm; Length: 12.83mm; Lifecycle Status: Production; Pins: 20; Thickness: 3.18mm; Width: 7.5mm; ComponentLink1URL: https://octopart.com:443/opatz8j6/c1?t=wZ0VCNJNos8uhiG1eOkJItGa29TZdX9U5YTvWe65tWqO_clHypEFr90RSsXmtcjCK2lW9JuoFSTCHleqZo0hvXambyFVrpWhRDa03zjAeS2npBFLn2ZdeMlI2NbNyxFRjGATeyzf-9uJODUaKIYeHY0lNBoElZKV5up7xkArN1ypBwkxG7CcSc59dO75okYBL3LvDjsmP-oaFvA5nypAE6t8qM1AzvKVH_C58px1fMdxx7wnDMIkasCTkH6HTWSujntXBLRFzafi1R2mnSXrnxzWfLveYPYV0EuD-426-OKnMTyvQmQHdlNqpjdCJ7MI8xbtVI0kVoJo1JZo_cB_-LeUlxckVEohInKxuXCkBIy0H9Ix6KfV1cXw-79mm5rpOwHRdyZRgldXjg&src-supplier=Texas+Instruments; ComponentLink1Description: https://octopart.com:443/opatz8j6/c1?t=wZ0VCNJNos8uhiG1eOkJItGa29TZdX9U5YTvWe65tWqO_clHypEFr90RSsXmtcjCK2lW9JuoFSTCHleqZo0hvXambyFVrpWhRDa03zjAeS2npBFLn2ZdeMlI2NbNyxFRjGATeyzf-9uJODUaKIYeHY0lNBoElZKV5up7xkArN1ypBwkxG7CcSc59dO75okYBL3LvDjsmP-oaFvA5nypAE6t8qM1AzvKVH_C58px1fMdxx7wnDMIkasCTkH6HTWSujntXBLRFzafi1R2mnSXrnxzWfLveYPYV0EuD-426-OKnMTyvQmQHdlNqpjdCJ7MI8xbtVI0kVoJo1JZo_cB_-LeUlxckVEohInKxuXCkBIy0H9Ix6KfV1cXw-79mm5rpOwHRdyZRgldXjg&src-supplier=Texas+Instruments; ComponentLink2URL: http://sigma.octopart.com:80/reach_statement/Texas-Instruments-company-64.pdf?src-supplier=Compliance+Statements; ComponentLink2Description: http://sigma.octopart.com:80/reach_statement/Texas-Instruments-company-64.pdf?src-supplier=Compliance+Statements; ComponentLink3URL: http://sigma.octopart.com:80/conflict_mineral_statement/Texas-Instruments-company-63.pdf?src-supplier=Compliance+Statements; ComponentLink3Description: http://sigma.octopart.com:80/conflict_mineral_statement/Texas-Instruments-company-63.pdf?src-supplier=Compliance+Statements
footprint SOIC-20-300mil
pins: 1 VIO, 2 INA, 3 INB, 4 OUTC, 5 OUTD, 6 GNDIO, 7 EN_IO1, 8 EN/FLT, 9 VDD, 10 GND1, 11 GND2, 12 VISOOUT, 13 VSEL, 14 EN_IO2, 15 GISOIN, 16 IND, 17 INC, 18 OUTB, 19 OUTA, 20 VISOIN

## L78L12ABUTR
designator U?
IC REG LINEAR 12V 100MA SOT89-3; Manufacturer: STMicroelectronics; Manufacturer Part Number: L78L12ABUTR; Supplier: Future Electronics; LCSC Part Number: C915681; RoHS: Yes; Item Type: IC; Stock: 30000; Pricing: 2500=0.136, 7500=0.132, 12500=0.13, 50000=0.126, 75000=0.123 (USD); ComponentLink1URL: https://datasheet.ciiva.com/4882/cd00000446-4882438.pdf?src-supplier=Mouser; ComponentLink1Description: https://datasheet.ciiva.com/4882/cd00000446-4882438.pdf?src-supplier=Mouser; ComponentLink2URL: https://datasheet.ciiva.com/16500/cd00000446-16500639.pdf?src-supplier=Future+Electronics; ComponentLink2Description: https://datasheet.ciiva.com/16500/cd00000446-16500639.pdf?src-supplier=Future+Electronics; ComponentLink3URL: https://datasheet.ciiva.com/3224/cd00000446-3224991.pdf?src-supplier=Avnet; ComponentLink3Description: https://datasheet.ciiva.com/3224/cd00000446-3224991.pdf?src-supplier=Avnet; ComponentLink4URL: https://datasheet.ciiva.com/2048/cd00000446-2048328.pdf?src-supplier=Digikey; ComponentLink4Description: https://datasheet.ciiva.com/2048/cd00000446-2048328.pdf?src-supplier=Digikey; ComponentLink5URL: https://datasheet.ciiva.com/2048/cd00000446-2048329.pdf?src-supplier=Digikey; ComponentLink5Description: https://datasheet.ciiva.com/2048/cd00000446-2048329.pdf?src-supplier=Digikey; ComponentLink6URL: https://datasheet.ciiva.com/2048/cd00000446-2048330.pdf?src-supplier=Digikey; ComponentLink6Description: https://datasheet.ciiva.com/2048/cd00000446-2048330.pdf?src-supplier=Digikey
footprint SOT-89-3
pins: 1 VOUT, 2 GND, 3 VIN

## L7805ABV
designator U?
IC REG LINEAR 5V 1.5A TO220AB; Manufacturer: STMicroelectronics; Manufacturer Part Number: L7805ABV; Max Supply Voltage: 35V; Number of Outputs: 1; Max Output current: 1A; Polarity: Positive; Quiescent Current: 6mA; Accuracy: 2%; Output Type: Fixed; Min Input Voltage: 7V; Dropout Voltage: 2V; Power Supply Rejection Ratio (PSRR): 68dB; Item Type: Regulator; Supplier: Mouser; Supplier Part Number: 511-L7805ABV; RoHS: Yes; Category: Voltage Regulators - Linear; Stock: 15048; Pricing: 1=0.75, 10=0.626, 50=0.626, 100=0.511, 1000=0.313, 10000=0.276 (USD); Mounting Technology: Through Hole; Case/Package: TO; Pins: 3; Min Operating Temperature: -40°C; Max Operating Temperature: 125°C; Output Voltage: 5V; Output Current: 1.5A; Packaging: Rail/Tube; Package Quantity: 50; Nominal Output Voltage: 5V; Number of Regulators: 1; Min Output Voltage: 5V; Max Output Voltage: 5V; Output Voltage Accuracy: 2%; Series: -; Output Configuration: Positive; Length: 10.4mm; Width: 4.6mm; Height: 9.15mm; Radiation Hardening: No; Reach SVHC Compliant: No; Lead Free: Lead Free; RoHS Compliant: Yes; ComponentLink1URL: https://datasheet.ciiva.com/1512/1696820-1512331.pdf?src-supplier=Element14; ComponentLink1Description: https://datasheet.ciiva.com/1512/1696820-1512331.pdf?src-supplier=Element14; ComponentLink2URL: https://datasheet.ciiva.com/2052/cd00000444-2052290.pdf?src-supplier=Digi-Key; ComponentLink2Description: https://datasheet.ciiva.com/2052/cd00000444-2052290.pdf?src-supplier=Digi-Key; ComponentLink3URL: https://datasheet.ciiva.com/1511/1805459-1511907.pdf?src-supplier=Element14; ComponentLink3Description: https://datasheet.ciiva.com/1511/1805459-1511907.pdf?src-supplier=Element14; LCSC Part Number: C16807
footprint TO-220
pins: 1 VIN, 2 GND, 3 VOUT

## LD1085D2T33R
designator U?
IC REG LINEAR 3.3V 3A D2PAK; Manufacturer: STMicroelectronics; Manufacturer Part Number: LD1085D2T33R; Number of Outputs: 1; Max Supply Voltage: 30V; Polarity: Positive; Quiescent Current: 10mA; Accuracy: 1%; Output Type: Fixed; Dropout Voltage: 1.3V; Min Supply Voltage: 4.9V; Min Input Voltage: 6.3V; Input Bias Current: 5mA; Max Output Voltage: 3.333V; Number of Channels: 1NUMBER; Supplier: Mouser; LCSC Part Number: C7913; RoHS: Yes; Item Type: IC; Stock: 7725; Pricing: 1=1.77, 10=1.21, 50=1.21, 100=1.08, 1000=0.906, 10000=0.896 (USD); Mounting Technology: Surface Mount; Case/Package: TO-263; Pins: 3; Min Operating Temperature: -40°C; Max Operating Temperature: 125°C; Max Output current: 3A; Output Voltage: 3.3V; Packaging: Tape and Reel; Output Current: 3A; Package Quantity: 1; Nominal Output Voltage: 3.3V; Number of Regulators: 1; Min Output Voltage: 3.3V; Termination: SMD/SMT; Output Voltage Accuracy: 1%; Series: -; Length: 10.4mm; Width: 9.35mm; Height: 4.6mm; Radiation Hardening: No; Reach SVHC Compliant: No; Lead Free: Lead Free; RoHS Compliant: Yes; ComponentLink1URL: https://datasheet.ciiva.com/15111/getdatasheetpartid-65476-15111291.pdf?src-supplier=Verical; ComponentLink1Description: https://datasheet.ciiva.com/15111/getdatasheetpartid-65476-15111291.pdf?src-supplier=Verical; ComponentLink2URL: https://datasheet.ciiva.com/1511/1761309-1511542.pdf?src-supplier=Element14; ComponentLink2Description: https://datasheet.ciiva.com/1511/1761309-1511542.pdf?src-supplier=Element14; ComponentLink3URL: https://datasheet.ciiva.com/22694/1761309-22694841.pdf?src-supplier=Element14; ComponentLink3Description: https://datasheet.ciiva.com/22694/1761309-22694841.pdf?src-supplier=Element14; ComponentLink4URL: https://datasheet.ciiva.com/2044/cd00001883-2044188.pdf?src-supplier=Digikey; ComponentLink4Description: https://datasheet.ciiva.com/2044/cd00001883-2044188.pdf?src-supplier=Digikey; ComponentLink5URL: https://datasheet.ciiva.com/2044/cd00001883-2044187.pdf?src-supplier=Digikey; ComponentLink5Description: https://datasheet.ciiva.com/2044/cd00001883-2044187.pdf?src-supplier=Digikey; ComponentLink6URL: https://datasheet.ciiva.com/2044/cd00001883-2044189.pdf?src-supplier=Digikey; ComponentLink6Description: https://datasheet.ciiva.com/2044/cd00001883-2044189.pdf?src-supplier=Digikey; ComponentLink7URL: https://datasheet.ciiva.com/16375/cd00001883-16375381.pdf?src-supplier=Future+Electronics; ComponentLink7Description: https://datasheet.ciiva.com/16375/cd00001883-16375381.pdf?src-supplier=Future+Electronics; ComponentLink8URL: https://datasheet.ciiva.com/41439/001184676-da-01-en-ic-reg-ldo-3-3-ld1085d2t33r-to-263-3-stm-41439834.pdf?src-supplier=Conrad; ComponentLink8Description: https://datasheet.ciiva.com/41439/001184676-da-01-en-ic-reg-ldo-3-3-ld1085d2t33r-to-263-3-stm-41439834.pdf?src-supplier=Conrad
footprint TO-263-2
pins: 1 GND, 2 VOUT, 3 VIN

## LD1117AG-33-AB3-A-R
designator U?
75dB@(120Hz) 1A Fixed 3.3V~3.3V Positive 15V SOT-89-3 Linear Voltage Regulators (LDO) ROHS; Manufacturer: UTC; Manufacturer Part Number: LD1117AG-33-AB3-A-R; Item Type: IC; Package: SOT-89-3; LCSC Part Number: C81768; ComponentLink1Description: LCSC; ComponentLink1URL: https://www.lcsc.com/product-detail/Linear-Voltage-Regulators-LDO_UTC-Unisonic-Tech-LD1117AG-33-AB3-A-R_C81768.html
footprint SOT-89-3
pins: 1 GND, 2 VOUT, 3 VIN

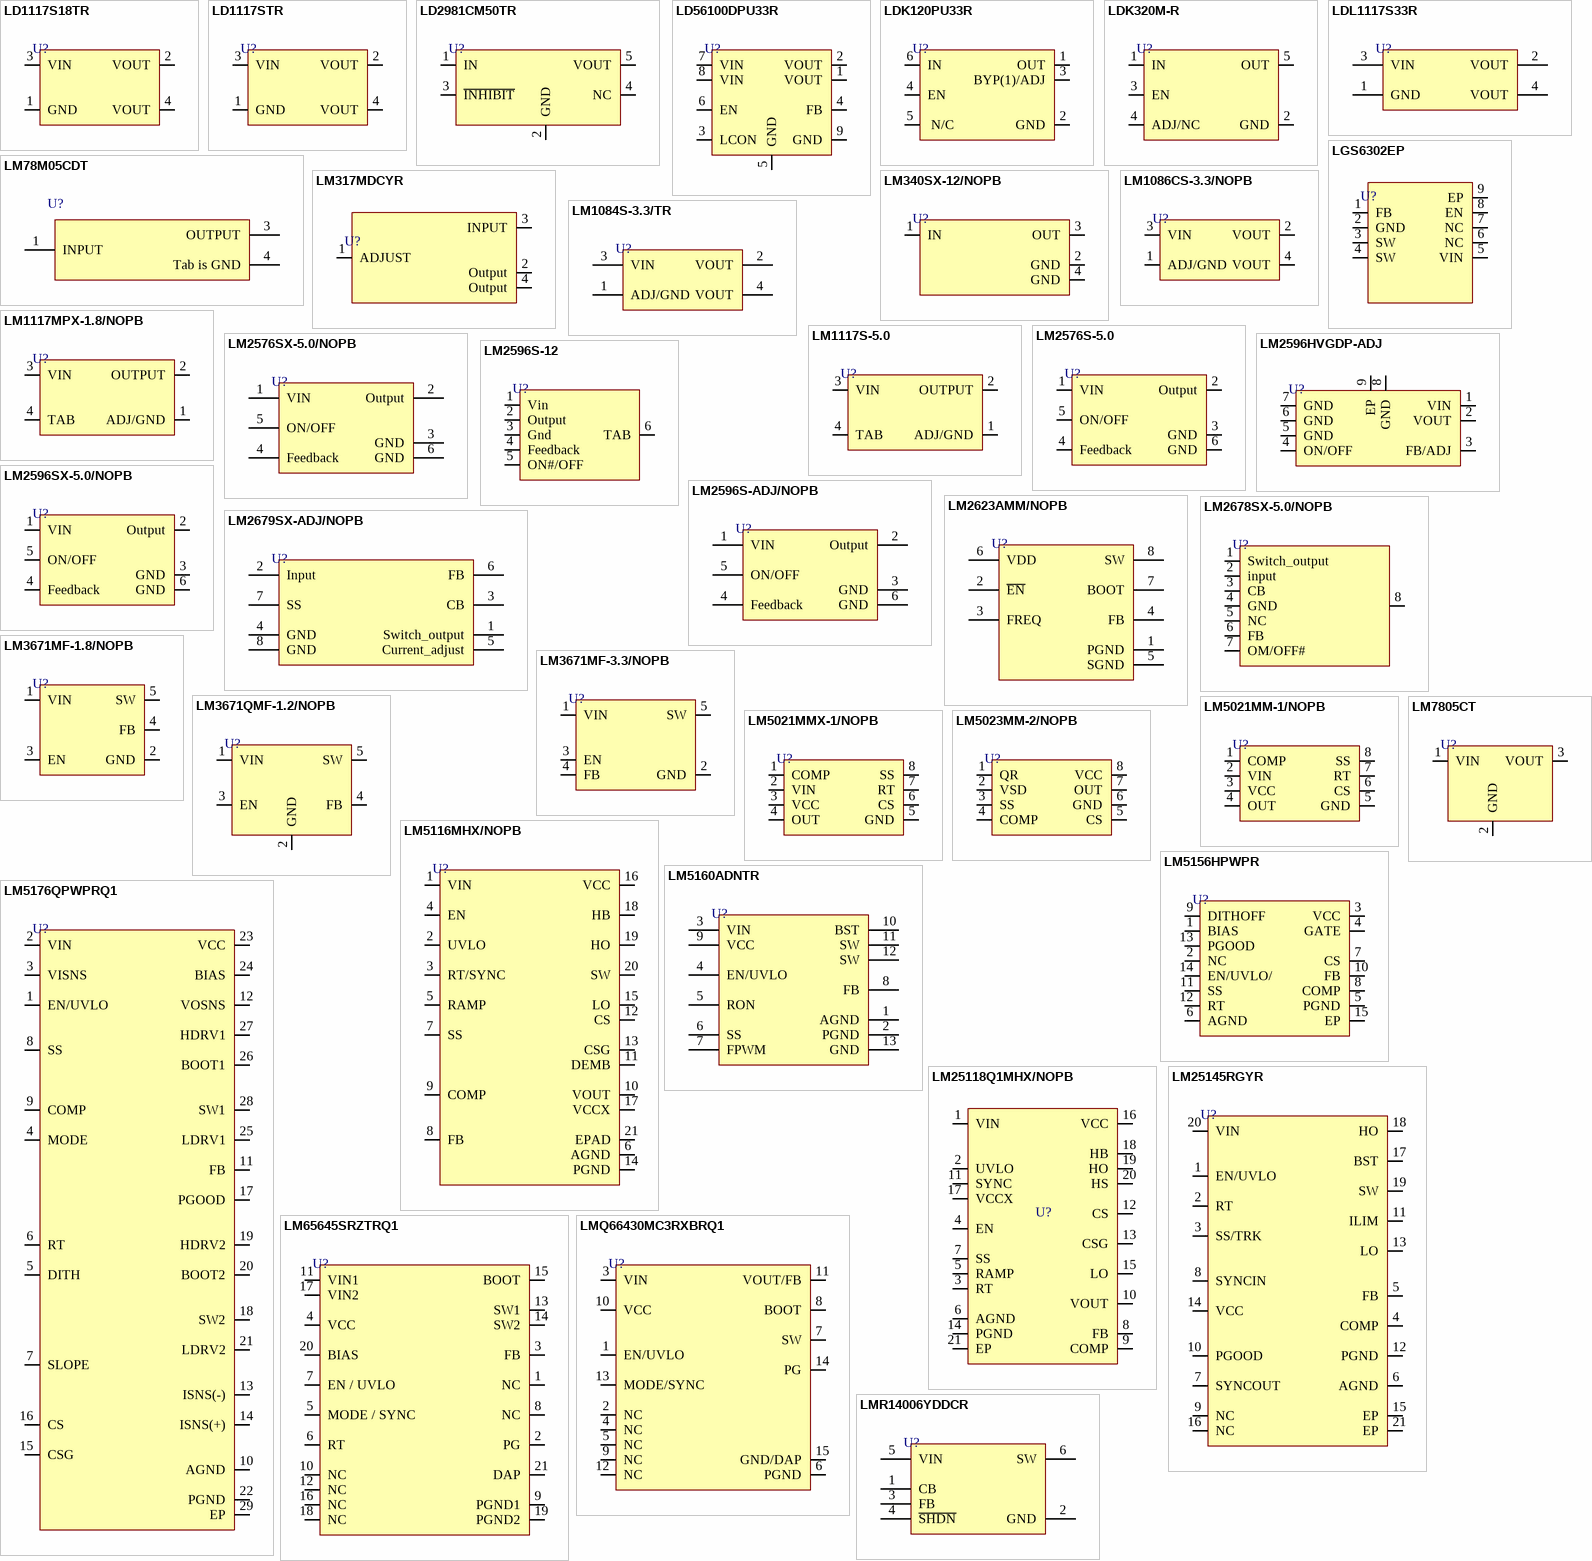
[diagram p1: symbols LD1117S18TR to LMR14006YDDCR]

## LD1117S18TR
designator U?
IC REG LINEAR 1.8V 800MA SOT-223; Manufacturer: STMicroelectronics; Manufacturer Part Number: LD1117S18TR; Accuracy: 1%; Dropout Voltage: 1.1V; Input Bias Current: 5mA; Max Supply Voltage: 15V; Max Junction Temperature (Tj): 125°C; Max Output current: 1.3A; Max Power Dissipation: 12W; Min Input Voltage: 3.3V; Number of Channels: 1; Output Type: Fixed; Polarity: Positive; Voltage Tolerance: 2%; Supplier: Arrow Electronics; LCSC Part Number: C80598; RoHS: Compliant; Item Type: IC; Stock: 20000; Pricing: 5000=0.162, 7500=0.16, 10000=0.158, 12500=0.157, 17500=0.155, 20000=0.153 (USD); Case/Package: SOT-223; China RoHS: Compliant; Height: 1.8mm; Height - Seated (Max): 1.9mm; Lead Free: Lead Free; Length: 6.5mm; Lifecycle Status: Production; Max Operating Temperature: 125°C; Min Operating Temperature: 0°C; Min Output Voltage: 1.8V; Mounting Technology: Surface Mount; Nominal Output Voltage: 1.8V; Number of Circuits: 1; Number of Outputs: 1; Number of Regulators: 1; Number of Terminals: 4; Output Current: 800mA; Output Voltage: 1.8V; Output Voltage Accuracy: 1%; Packaging: Tape and Reel; Power Dissipation: 12W; Quiescent Current: 5mA; Radiation Hardening: No; REACH SVHC: Yes; Schedule B: 8542390000; Terminal Pitch: 2.3mm; Width: 3.5mm; ComponentLink1URL: https://datasheet.octopart.com:443/LD1117S18TR-STMicroelectronics-datasheet-21631343.pdf?src-supplier=Augswan; ComponentLink1Description: https://datasheet.octopart.com:443/LD1117S18TR-STMicroelectronics-datasheet-21631343.pdf?src-supplier=Augswan; ComponentLink2URL: https://datasheet.octopart.com:443/LD1117S18TR-STMicroelectronics-datasheet-10835789.pdf?src-supplier=Future+Electronics; ComponentLink2Description: https://datasheet.octopart.com:443/LD1117S18TR-STMicroelectronics-datasheet-10835789.pdf?src-supplier=Future+Electronics; ComponentLink3URL: https://datasheet.octopart.com:443/LD1117S18TR-STMicroelectronics-datasheet-10390305.pdf?src-supplier=Future+Electronics; ComponentLink3Description: https://datasheet.octopart.com:443/LD1117S18TR-STMicroelectronics-datasheet-10390305.pdf?src-supplier=Future+Electronics; ComponentLink4URL: https://datasheet.octopart.com:443/LD1117S18TR-STMicroelectronics-datasheet-10544930.pdf?src-supplier=Future+Electronics; ComponentLink4Description: https://datasheet.octopart.com:443/LD1117S18TR-STMicroelectronics-datasheet-10544930.pdf?src-supplier=Future+Electronics; ComponentLink5URL: https://datasheet.octopart.com:443/LD1117S18TR-STMicroelectronics-datasheet-12512609.pdf?src-supplier=STMicroelectronics; ComponentLink5Description: https://datasheet.octopart.com:443/LD1117S18TR-STMicroelectronics-datasheet-12512609.pdf?src-supplier=STMicroelectronics; ComponentLink6URL: https://datasheet.octopart.com:443/LD1117S18TR-STMicroelectronics-datasheet-140259827.pdf?src-supplier=Farnell; ComponentLink6Description: https://datasheet.octopart.com:443/LD1117S18TR-STMicroelectronics-datasheet-140259827.pdf?src-supplier=Farnell; ComponentLink7URL: https://datasheet.octopart.com:443/LD1117S18TR-STMicroelectronics-datasheet-39139416.pdf?src-supplier=element14+APAC; ComponentLink7Description: https://datasheet.octopart.com:443/LD1117S18TR-STMicroelectronics-datasheet-39139416.pdf?src-supplier=element14+APAC; ComponentLink8URL: https://datasheet.octopart.com:443/LD1117S18TR-STMicroelectronics-datasheet-14168930.pdf?src-supplier=iiiC; ComponentLink8Description: https://datasheet.octopart.com:443/LD1117S18TR-STMicroelectronics-datasheet-14168930.pdf?src-supplier=iiiC
footprint SOT- 223
pins: 1 GND, 2 VOUT, 3 VIN, 4 VOUT

## LD1117STR
designator U?
IC REG LIN POS ADJ 800MA SOT-223; Manufacturer: STMicroelectronics; Manufacturer Part Number: LD1117STR; Accuracy: 1%; Dropout Voltage: 1.1V; Input Bias Current: 5mA; Max Supply Voltage: 15V; Max Junction Temperature (Tj): 125°C; Max Output current: 1.3A; Max Power Dissipation: 12W; Min Input Voltage: 2.35V; Min Output Voltage: 1.25V; Number of Channels: 1; Output Type: Adjustable; Polarity: Positive; Reference Voltage: 1.262V; Supplier: Arrow Electronics; LCSC Part Number: C283466; RoHS: Compliant; Item Type: IC; Stock: 127500; Pricing: 2500=0.1417, 7500=0.109 (USD); Case/Package: SOT-223; China RoHS: Compliant; Contact Plating: Tin; Height: 1.8mm; Height - Seated (Max): 1.9mm; Lead Free: Lead Free; Length: 6.5mm; Lifecycle Status: Production; Max Operating Temperature: 125°C; Max Output Voltage: 15V; Min Operating Temperature: 0°C; Mounting Technology: Surface Mount; Number of Circuits: 1; Number of Outputs: 1; Pins: 4; Number of Regulators: 1; Number of Terminals: 4; Output Current: 800mA; Output Voltage: 15V; Output Voltage Accuracy: 1%; Packaging: Tape and Reel; Power Dissipation: 12W; Quiescent Current: 5mA; Radiation Hardening: No; REACH SVHC: Yes; Schedule B: 8542390000, 8542390000|8542390000|8542390000|8542390000|8542390000; Terminal Pitch: 2.3mm; Termination: SMD/SMT; Weight: 4.535924g; Width: 3.5mm; ComponentLink1URL: https://datasheet.octopart.com:443/LD1117STR-STMicroelectronics-datasheet-21631343.pdf?src-supplier=Newark; ComponentLink1Description: https://datasheet.octopart.com:443/LD1117STR-STMicroelectronics-datasheet-21631343.pdf?src-supplier=Newark; ComponentLink2URL: https://datasheet.octopart.com:443/LD1117STR-STMicroelectronics-datasheet-9746.pdf?src-supplier=Newark; ComponentLink2Description: https://datasheet.octopart.com:443/LD1117STR-STMicroelectronics-datasheet-9746.pdf?src-supplier=Newark; ComponentLink3URL: https://datasheet.octopart.com:443/LD1117STR-STMicroelectronics-datasheet-12512609.pdf?src-supplier=element14+APAC; ComponentLink3Description: https://datasheet.octopart.com:443/LD1117STR-STMicroelectronics-datasheet-12512609.pdf?src-supplier=element14+APAC; ComponentLink4URL: https://datasheet.octopart.com:443/LD1117STR-STMicroelectronics-datasheet-141402766.pdf?src-supplier=element14+APAC; ComponentLink4Description: https://datasheet.octopart.com:443/LD1117STR-STMicroelectronics-datasheet-141402766.pdf?src-supplier=element14+APAC; ComponentLink5URL: https://datasheet.octopart.com:443/LD1117STR-STMicroelectronics-datasheet-10835789.pdf?src-supplier=Farnell; ComponentLink5Description: https://datasheet.octopart.com:443/LD1117STR-STMicroelectronics-datasheet-10835789.pdf?src-supplier=Farnell; ComponentLink6URL: https://datasheet.octopart.com:443/LD1117STR-STMicroelectronics-datasheet-10544930.pdf?src-supplier=Future+Electronics; ComponentLink6Description: https://datasheet.octopart.com:443/LD1117STR-STMicroelectronics-datasheet-10544930.pdf?src-supplier=Future+Electronics; ComponentLink7URL: https://datasheet.octopart.com:443/LD1117STR-STMicroelectronics-datasheet-10390305.pdf?src-supplier=Future+Electronics; ComponentLink7Description: https://datasheet.octopart.com:443/LD1117STR-STMicroelectronics-datasheet-10390305.pdf?src-supplier=Future+Electronics; ComponentLink8URL: https://datasheet.octopart.com:443/LD1117STR-STMicroelectronics-datasheet-8082140.pdf?src-supplier=Nu+Horizons; ComponentLink8Description: https://datasheet.octopart.com:443/LD1117STR-STMicroelectronics-datasheet-8082140.pdf?src-supplier=Nu+Horizons; ComponentLink9URL: https://datasheet.octopart.com:443/LD1117STR-STMicroelectronics-datasheet-5314031.pdf?src-supplier=Nu+Horizons; ComponentLink9Description: https://datasheet.octopart.com:443/LD1117STR-STMicroelectronics-datasheet-5314031.pdf?src-supplier=Nu+Horizons; ComponentLink10URL: https://datasheet.octopart.com:443/LD1117STR-STMicroelectronics-datasheet-502396.pdf?src-supplier=Nu+Horizons; ComponentLink10Description: https://datasheet.octopart.com:443/LD1117STR-STMicroelectronics-datasheet-502396.pdf?src-supplier=Nu+Horizons; ComponentLink11URL: https://datasheet.octopart.com:443/LD1117STR-STMicroelectronics-datasheet-109521.pdf?src-supplier=Nu+Horizons; ComponentLink11Description: https://datasheet.octopart.com:443/LD1117STR-STMicroelectronics-datasheet-109521.pdf?src-supplier=Nu+Horizons; ComponentLink12URL: https://datasheet.octopart.com:443/LD1117STR-STMicroelectronics-datasheet-14168930.pdf?src-supplier=iiiC; ComponentLink12Description: https://datasheet.octopart.com:443/LD1117STR-STMicroelectronics-datasheet-14168930.pdf?src-supplier=iiiC; ComponentLink13URL: https://datasheet.octopart.com:443/LD1117STR-STMicroelectronics-datasheet-8710537.pdf?src-supplier=element14; ComponentLink13Description: https://datasheet.octopart.com:443/LD1117STR-STMicroelectronics-datasheet-8710537.pdf?src-supplier=element14; ComponentLink14URL: https://datasheet.octopart.com:443/LD1117STR-STMicroelectronics-datasheet-8453752.pdf?src-supplier=element14; ComponentLink14Description: https://datasheet.octopart.com:443/LD1117STR-STMicroelectronics-datasheet-8453752.pdf?src-supplier=element14; ComponentLink15URL: https://datasheet.octopart.com:443/LD1117STR-STMicroelectronics-datasheet-8188304.pdf?src-supplier=Jameco; ComponentLink15Description: https://datasheet.octopart.com:443/LD1117STR-STMicroelectronics-datasheet-8188304.pdf?src-supplier=Jameco
footprint SOT- 223
pins: 1 GND, 2 VOUT, 3 VIN, 4 VOUT